# EAGLE library part IR9022 (library joakim-old)
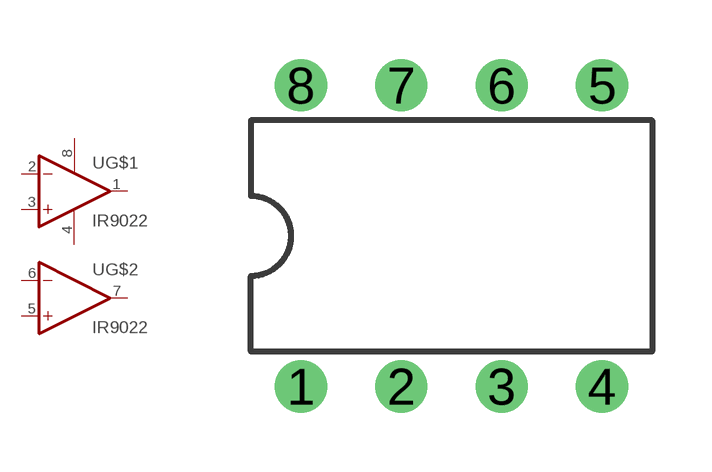
[diagram p28: symbol with the pads of DIL08J; footprint DIL08J]

Designator prefix -; gates G$1=OPAMP_J G$2=OPAMP_J G$3=PWR+-

## IR9022  [DIL08J]
1  G$1:OUT  out
2  G$1:-IN  in
3  G$1:+IN  in
4  G$3:V-  pwr
5  G$2:+IN  in
6  G$2:-IN  in
7  G$2:OUT  out
8  G$3:V+  pwr

## Footprint DIL08J (pad centres in mm)
Dual In Line Package
drill 0.813 pad 1.27: 1 -3.81,-3.81; 2 -1.27,-3.81; 3 1.27,-3.81; 4 3.81,-3.81; 5 3.81,3.81; 6 1.27,3.81; 7 -1.27,3.81; 8 -3.81,3.81